# Altium footprint library SS3P6L-M386A.PcbLib: 3 footprints
Each footprint in its own frame and in the unit in brackets; x right, y up, seen from the top. Pads: shape width x height; smd on the part's side, far side on the other; paste and mask are expansions set on the pad; w line width, h text height; cw(c..) or ccw(c..) is an arc to the next point about the centre after c.
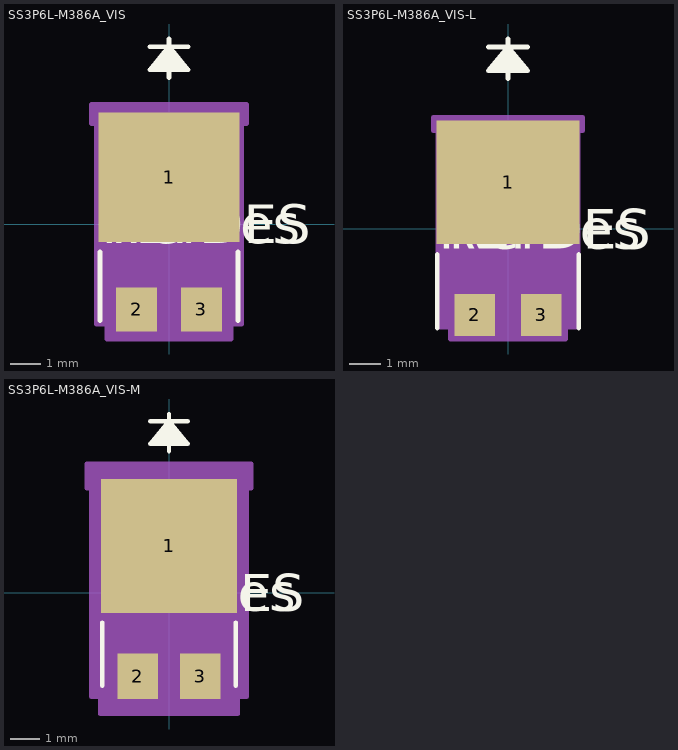
[diagram p0: the footprints below, top view; thin cyan lines are the x and y axes]

## SS3P6L-M386A_VIS [mil]
pads (3):
  rect 183x168 smd paste+0 mask+0: 1(0,61)
  rect 53x57 smd paste+0 mask+0: 2(-42,-110.5) 3(42,-110.5)
Top Overlay:
  lines w6: -89.5,-125 -89.5,-36.1 ; -25,230 25,230 ; -20,200 0,230 ; -15,200 0,230 ; -10,200 0,230 ; -5,200 0,230 ; 0,190 0,240 ; 5,200 0,230 ; 10,200 0,230 ; 15,200 0,230 ; 20,200 0,230 ; 89.5,-125 89.5,-36.1 ; 0,230 25,200 -25,200 0,230
  text "RefDes" at -75,-25 h50
  text "REFDES" at -87.5,-25 h50
Mechanical 13:
  lines w1: -25,230 25,230 ; -20,200 0,230 ; -15,200 0,230 ; -10,200 0,230 ; -5,200 0,230 ; 0,190 0,240 ; 5,200 0,230 ; 10,200 0,230 ; 15,200 0,230 ; 20,200 0,230 ; 0,230 25,200 -25,200 0,230 ; -84.5,-120 84.5,-120 84.5,120 -84.5,120 -84.5,-120
  text "RefDes2" at -87.5,-25 h50
Mechanical 15:
  region: -80.5,-130 -94.5,-130 -94.5,130 -100.5,130 -100.5,155 100.5,155 100.5,130 94.5,130 94.5,-130 80.5,-130 80.5,-149 -80.5,-149
  region: 84.5,-120 -84.5,-120 -84.5,120 84.5,120
  lines w6: -100.5,130 -94.5,130 -94.5,-130 -80.5,-130 -80.5,-149 80.5,-149 80.5,-130 94.5,-130 94.5,130 100.5,130 100.5,155 -100.5,155 -100.5,130
3D body "SS3P6L-M386A_VIS.step": height 49.09, standoff 0, extent -90.51,-130.98 90.51,130.98

## SS3P6L-M386A_VIS-L [mil]
pads (3):
  rect 181x156 smd paste+0 mask+0: 1(0,59)
  rect 51x53 smd paste+0 mask+0: 2(-42,-108.5) 3(42,-108.5)
Top Overlay:
  lines w6: -89.5,-125 -89.5,-32.1 ; -25,230 25,230 ; -20,200 0,230 ; -15,200 0,230 ; -10,200 0,230 ; -5,200 0,230 ; 0,190 0,240 ; 5,200 0,230 ; 10,200 0,230 ; 15,200 0,230 ; 20,200 0,230 ; 89.5,-125 89.5,-32.1 ; 0,230 25,200 -25,200 0,230
  text "RefDes" at -75,-25 h50
  text "REFDES" at -87.5,-25 h50
Mechanical 13:
  lines w1: -25,230 25,230 ; -20,200 0,230 ; -15,200 0,230 ; -10,200 0,230 ; -5,200 0,230 ; 0,190 0,240 ; 5,200 0,230 ; 10,200 0,230 ; 15,200 0,230 ; 20,200 0,230 ; 0,230 25,200 -25,200 0,230 ; -84.5,-120 84.5,-120 84.5,120 -84.5,120 -84.5,-120
  text "RefDes2" at -87.5,-25 h50
Mechanical 15:
  region: -72.5,-124 -88.5,-124 -88.5,124 -94.5,124 -94.5,141 94.5,141 94.5,124 88.5,124 88.5,-124 72.5,-124 72.5,-139 -72.5,-139
  region: 84.5,-120 -84.5,-120 -84.5,120 84.5,120
  lines w6: -94.5,124 -88.5,124 -88.5,-124 -72.5,-124 -72.5,-139 72.5,-139 72.5,-124 88.5,-124 88.5,124 94.5,124 94.5,141 -94.5,141 -94.5,124
3D body "SS3P6L-M386A_VIS.step": height 49.09, standoff 0, extent -90.51,-130.98 90.51,130.98

## SS3P6L-M386A_VIS-M [mil]
pads (3):
  rect 183x180 smd paste+0 mask+0: 1(0,63)
  rect 55x61 smd paste+0 mask+0: 2(-42,-112.5) 3(42,-112.5)
Top Overlay:
  lines w6: -89.5,-125 -89.5,-40.1 ; -25,230 25,230 ; -20,200 0,230 ; -15,200 0,230 ; -10,200 0,230 ; -5,200 0,230 ; 0,190 0,240 ; 5,200 0,230 ; 10,200 0,230 ; 15,200 0,230 ; 20,200 0,230 ; 89.5,-125 89.5,-40.1 ; 0,230 25,200 -25,200 0,230
  text "RefDes" at -75,-25 h50
  text "REFDES" at -87.5,-25 h50
Mechanical 13:
  lines w1: -25,230 25,230 ; -20,200 0,230 ; -15,200 0,230 ; -10,200 0,230 ; -5,200 0,230 ; 0,190 0,240 ; 5,200 0,230 ; 10,200 0,230 ; 15,200 0,230 ; 20,200 0,230 ; 0,230 25,200 -25,200 0,230 ; -84.5,-120 84.5,-120 84.5,120 -84.5,120 -84.5,-120
  text "RefDes2" at -87.5,-25 h50
Mechanical 15:
  region: -92.5,-140 -104.5,-140 -104.5,140 -110.5,140 -110.5,173 110.5,173 110.5,140 104.5,140 104.5,-140 92.5,-140 92.5,-163 -92.5,-163
  region: 84.5,-120 -84.5,-120 -84.5,120 84.5,120
  lines w6: -110.5,140 -104.5,140 -104.5,-140 -92.5,-140 -92.5,-163 92.5,-163 92.5,-140 104.5,-140 104.5,140 110.5,140 110.5,173 -110.5,173 -110.5,140
3D body "SS3P6L-M386A_VIS.step": height 49.09, standoff 0, extent -90.51,-130.98 90.51,130.98